# Altium footprint library Package_DFN_QFN.PcbLib: 735 footprints (part 21 of 46)
Each footprint in its own frame and in the unit in brackets; x right, y up, seen from the top. Pads: shape width x height; smd on the part's side, far side on the other; paste and mask are expansions set on the pad; w line width, h text height; cw(c..) or ccw(c..) is an arc to the next point about the centre after c.
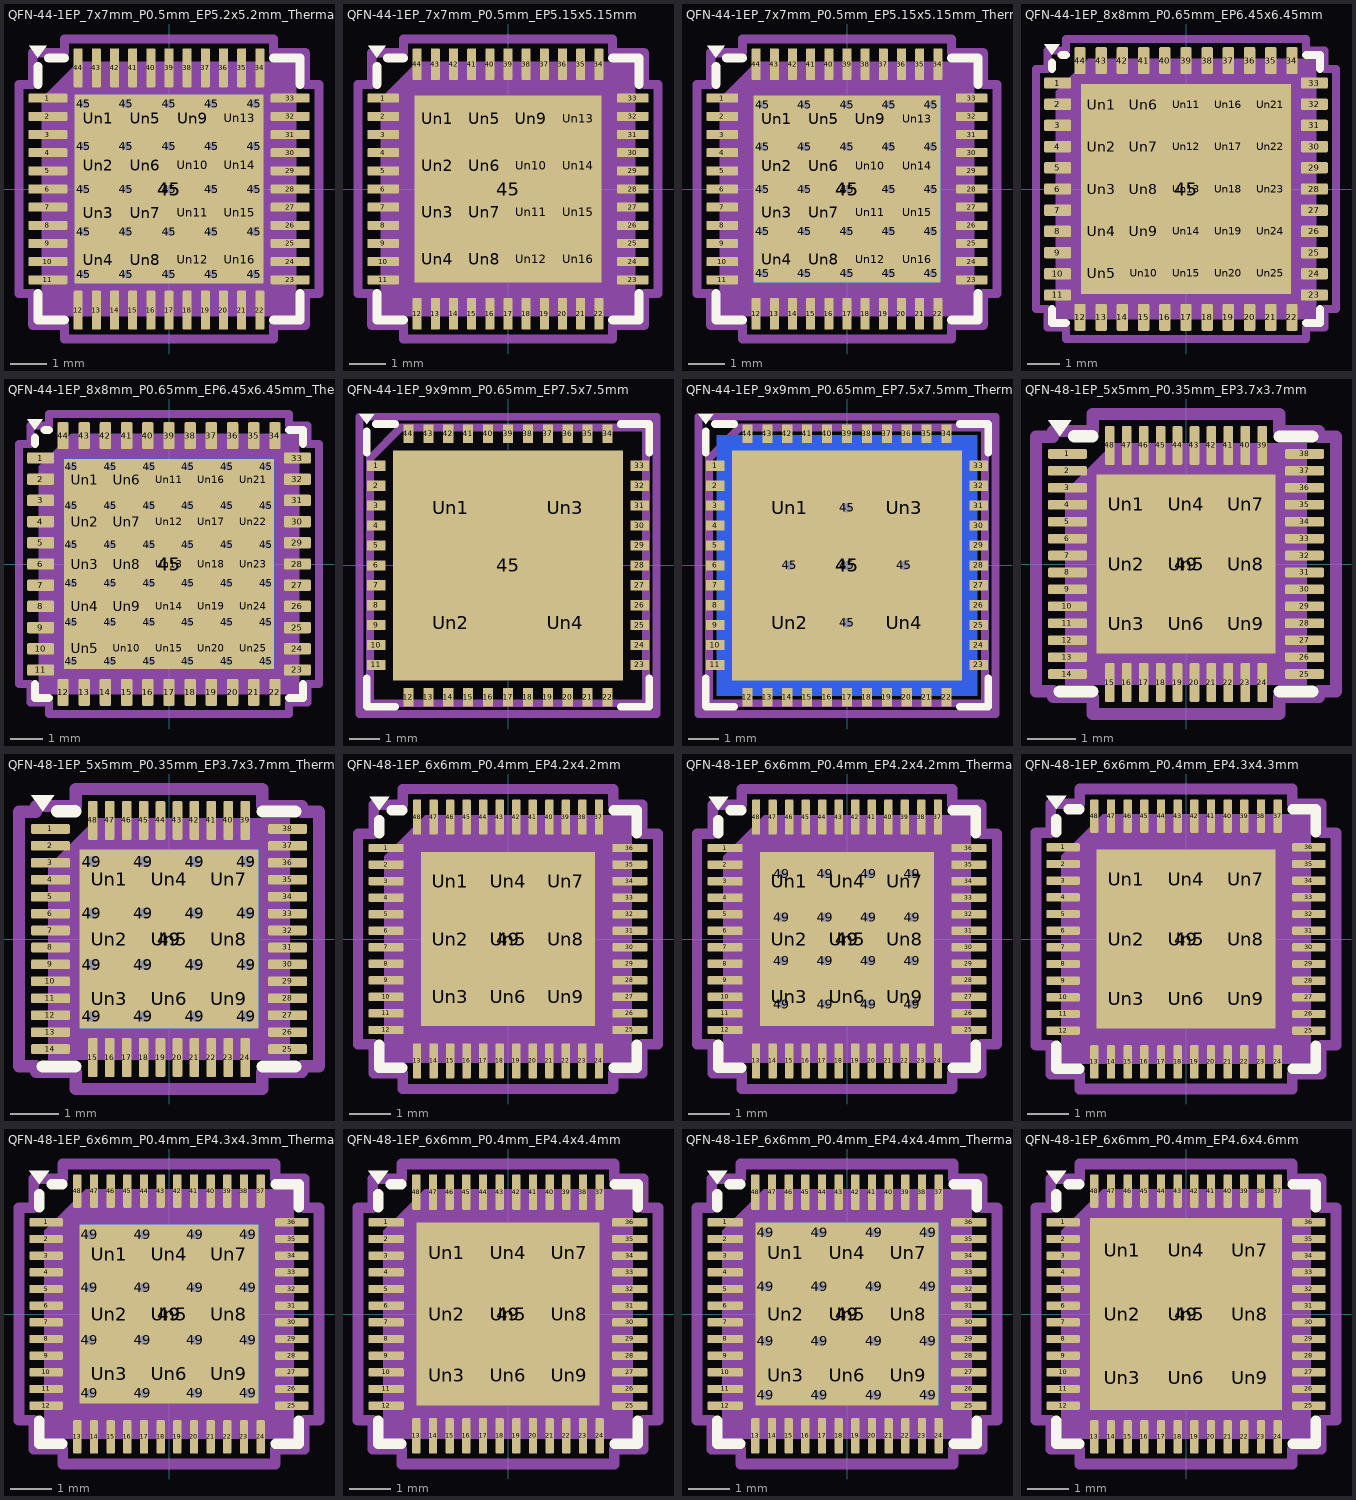
[diagram p20: the footprints below, top view; thin cyan lines are the x and y axes]

## QFN-44-1EP_7x7mm_P0.5mm_EP5.2x5.2mm_ThermalVias [mm] "QFN-44-1EP_7x7mm_P0.5mm_EP5.2x5.2mm_ThermalVias"
pads (87):
  rrect25% 1.075x0.25 smd: 1(-3.337,2.5) 2(-3.337,2) 3(-3.337,1.5) 4(-3.337,1) 5(-3.337,0.5) 6(-3.337,0) 7(-3.337,-0.5) 8(-3.337,-1) 9(-3.337,-1.5) 10(-3.337,-2) 11(-3.337,-2.5) 23(3.337,-2.5) 24(3.337,-2) 25(3.337,-1.5) 26(3.337,-1) 27(3.337,-0.5) 28(3.337,0) 29(3.337,0.5) 30(3.337,1) 31(3.337,1.5) 32(3.337,2) 33(3.337,2.5)
  rrect25% 0.25x1.075 smd: 12(-2.5,-3.337) 13(-2,-3.337) 14(-1.5,-3.337) 15(-1,-3.337) 16(-0.5,-3.337) 17(0,-3.337) 18(0.5,-3.337) 19(1,-3.337) 20(1.5,-3.337) 21(2,-3.337) 22(2.5,-3.337) 34(2.5,3.337) 35(2,3.337) 36(1.5,3.337) 37(1,3.337) 38(0.5,3.337) 39(0,3.337) 40(-0.5,3.337) 41(-1,3.337) 42(-1.5,3.337) 43(-2,3.337) 44(-2.5,3.337)
  round 0.5 hole 0.2: 45(-2.35,-2.35) 45(-2.35,-1.175) 45(-2.35,0) 45(-2.35,1.175) 45(-2.35,2.35) 45(-1.175,-2.35) 45(-1.175,-1.175) 45(-1.175,0) 45(-1.175,1.175) 45(-1.175,2.35) 45(0,-2.35) 45(0,-1.175) 45(0,0) 45(0,1.175) 45(0,2.35) 45(1.175,-2.35) 45(1.175,-1.175) 45(1.175,0) 45(1.175,1.175) 45(1.175,2.35) 45(2.35,-2.35) 45(2.35,-1.175) 45(2.35,0) 45(2.35,1.175) 45(2.35,2.35)
  rect 5.2x5.2 smd: 45(0,0)
  rect 5.2x5.2 smd far side: 45(0,0)
  rrect25% 1.01x1.01 on Top Paste: Un1(-1.95,1.95) Un2(-1.95,0.65) Un3(-1.95,-0.65) Un4(-1.95,-1.95) Un5(-0.65,1.95) Un6(-0.65,0.65) Un7(-0.65,-0.65) Un8(-0.65,-1.95) Un9(0.65,1.95) Un10(0.65,0.65) Un11(0.65,-0.65) Un12(0.65,-1.95) Un13(1.95,1.95) Un14(1.95,0.65) Un15(1.95,-0.65) Un16(1.95,-1.95)
F.SilkS:
  region: -3.61,3.61 -3.85,3.94 -3.37,3.94
  lines w0.254: -3.61,-2.885 -3.61,-3.61 -2.885,-3.61 ; -3.61,2.885 -3.61,3.37 ; -3.31,3.61 -2.885,3.61 ; 2.885,-3.61 3.61,-3.61 3.61,-2.885 ; 2.885,3.61 3.61,3.61 3.61,2.885
Top Component Center:
  lines w0.127: -0.127,0 0.127,0 -0.127,0 ; 0,-0.127 0,0.127 0,-0.127
Top Assembly:
  region: 3.5,-3.5 -3.5,-3.5 -3.5,2.5 -2.5,3.5 3.5,3.5
Top Courtyard:
  lines w0.254: -4.13,-2.88 -3.75,-2.88 -3.75,-3.75 -2.88,-3.75 -2.88,-4.13 2.88,-4.13 2.88,-3.75 3.75,-3.75 3.75,-2.88 4.13,-2.88 4.13,2.88 3.75,2.88 3.75,3.75 2.88,3.75 2.88,4.13 -2.88,4.13 -2.88,3.75 -3.75,3.75 -3.75,2.88 -4.13,2.88 -4.13,-2.88
Top Designator:
  text ".Designator" at -3.43,-0.344 h1.52
3D body "QFN-44-1EP_7x7mm_P0.5mm_EP5.15x5.15mm.step": height 0.77, standoff 0, extent -3.5,-3.5 3.5,3.5

## QFN-44-1EP_7x7mm_P0.5mm_EP5.15x5.15mm [mm] "QFN-44-1EP_7x7mm_P0.5mm_EP5.15x5.15mm"
pads (61):
  rrect25% 0.875x0.25 smd: 1(-3.437,2.5) 2(-3.437,2) 3(-3.437,1.5) 4(-3.437,1) 5(-3.437,0.5) 6(-3.437,0) 7(-3.437,-0.5) 8(-3.437,-1) 9(-3.437,-1.5) 10(-3.437,-2) 11(-3.437,-2.5) 23(3.437,-2.5) 24(3.437,-2) 25(3.437,-1.5) 26(3.437,-1) 27(3.437,-0.5) 28(3.437,0) 29(3.437,0.5) 30(3.437,1) 31(3.437,1.5) 32(3.437,2) 33(3.437,2.5)
  rrect25% 0.25x0.875 smd: 12(-2.5,-3.437) 13(-2,-3.437) 14(-1.5,-3.437) 15(-1,-3.437) 16(-0.5,-3.437) 17(0,-3.437) 18(0.5,-3.437) 19(1,-3.437) 20(1.5,-3.437) 21(2,-3.437) 22(2.5,-3.437) 34(2.5,3.437) 35(2,3.437) 36(1.5,3.437) 37(1,3.437) 38(0.5,3.437) 39(0,3.437) 40(-0.5,3.437) 41(-1,3.437) 42(-1.5,3.437) 43(-2,3.437) 44(-2.5,3.437)
  rect 5.15x5.15 smd: 45(0,0)
  rrect24% 1.04x1.04 on Top Paste: Un1(-1.935,1.935) Un2(-1.935,0.645) Un3(-1.935,-0.645) Un4(-1.935,-1.935) Un5(-0.645,1.935) Un6(-0.645,0.645) Un7(-0.645,-0.645) Un8(-0.645,-1.935) Un9(0.645,1.935) Un10(0.645,0.645) Un11(0.645,-0.645) Un12(0.645,-1.935) Un13(1.935,1.935) Un14(1.935,0.645) Un15(1.935,-0.645) Un16(1.935,-1.935)
F.SilkS:
  region: -3.61,3.61 -3.85,3.94 -3.37,3.94
  lines w0.254: -3.61,-2.885 -3.61,-3.61 -2.885,-3.61 ; -3.61,2.885 -3.61,3.37 ; -3.31,3.61 -2.885,3.61 ; 2.885,-3.61 3.61,-3.61 3.61,-2.885 ; 2.885,3.61 3.61,3.61 3.61,2.885
Top Component Center:
  lines w0.127: -0.127,0 0.127,0 -0.127,0 ; 0,-0.127 0,0.127 0,-0.127
Top Assembly:
  region: 3.5,-3.5 -3.5,-3.5 -3.5,2.5 -2.5,3.5 3.5,3.5
Top Courtyard:
  lines w0.254: -4.13,-2.88 -3.75,-2.88 -3.75,-3.75 -2.88,-3.75 -2.88,-4.13 2.88,-4.13 2.88,-3.75 3.75,-3.75 3.75,-2.88 4.13,-2.88 4.13,2.88 3.75,2.88 3.75,3.75 2.88,3.75 2.88,4.13 -2.88,4.13 -2.88,3.75 -3.75,3.75 -3.75,2.88 -4.13,2.88 -4.13,-2.88
Top Designator:
  text ".Designator" at -3.43,-0.344 h1.52
3D body "QFN-44-1EP_7x7mm_P0.5mm_EP5.15x5.15mm.step": height 0.77, standoff 0, extent -3.5,-3.5 3.5,3.5

## QFN-44-1EP_7x7mm_P0.5mm_EP5.15x5.15mm_ThermalVias [mm] "QFN-44-1EP_7x7mm_P0.5mm_EP5.15x5.15mm_ThermalVias"
pads (87):
  rrect25% 0.875x0.25 smd: 1(-3.437,2.5) 2(-3.437,2) 3(-3.437,1.5) 4(-3.437,1) 5(-3.437,0.5) 6(-3.437,0) 7(-3.437,-0.5) 8(-3.437,-1) 9(-3.437,-1.5) 10(-3.437,-2) 11(-3.437,-2.5) 23(3.437,-2.5) 24(3.437,-2) 25(3.437,-1.5) 26(3.437,-1) 27(3.437,-0.5) 28(3.437,0) 29(3.437,0.5) 30(3.437,1) 31(3.437,1.5) 32(3.437,2) 33(3.437,2.5)
  rrect25% 0.25x0.875 smd: 12(-2.5,-3.437) 13(-2,-3.437) 14(-1.5,-3.437) 15(-1,-3.437) 16(-0.5,-3.437) 17(0,-3.437) 18(0.5,-3.437) 19(1,-3.437) 20(1.5,-3.437) 21(2,-3.437) 22(2.5,-3.437) 34(2.5,3.437) 35(2,3.437) 36(1.5,3.437) 37(1,3.437) 38(0.5,3.437) 39(0,3.437) 40(-0.5,3.437) 41(-1,3.437) 42(-1.5,3.437) 43(-2,3.437) 44(-2.5,3.437)
  round 0.5 hole 0.2: 45(-2.325,-2.325) 45(-2.325,-1.162) 45(-2.325,0) 45(-2.325,1.162) 45(-2.325,2.325) 45(-1.162,-2.325) 45(-1.162,-1.162) 45(-1.162,0) 45(-1.162,1.162) 45(-1.162,2.325) 45(0,-2.325) 45(0,-1.162) 45(0,0) 45(0,1.162) 45(0,2.325) 45(1.162,-2.325) 45(1.162,-1.162) 45(1.162,0) 45(1.162,1.162) 45(1.162,2.325) 45(2.325,-2.325) 45(2.325,-1.162) 45(2.325,0) 45(2.325,1.162) 45(2.325,2.325)
  rect 5.15x5.15 smd: 45(0,0)
  rect 5.15x5.15 smd far side: 45(0,0)
  rrect25% 1x1 on Top Paste: Un1(-1.935,1.935) Un2(-1.935,0.645) Un3(-1.935,-0.645) Un4(-1.935,-1.935) Un5(-0.645,1.935) Un6(-0.645,0.645) Un7(-0.645,-0.645) Un8(-0.645,-1.935) Un9(0.645,1.935) Un10(0.645,0.645) Un11(0.645,-0.645) Un12(0.645,-1.935) Un13(1.935,1.935) Un14(1.935,0.645) Un15(1.935,-0.645) Un16(1.935,-1.935)
F.SilkS:
  region: -3.61,3.61 -3.85,3.94 -3.37,3.94
  lines w0.254: -3.61,-2.885 -3.61,-3.61 -2.885,-3.61 ; -3.61,2.885 -3.61,3.37 ; -3.31,3.61 -2.885,3.61 ; 2.885,-3.61 3.61,-3.61 3.61,-2.885 ; 2.885,3.61 3.61,3.61 3.61,2.885
Top Component Center:
  lines w0.127: -0.127,0 0.127,0 -0.127,0 ; 0,-0.127 0,0.127 0,-0.127
Top Assembly:
  region: 3.5,-3.5 -3.5,-3.5 -3.5,2.5 -2.5,3.5 3.5,3.5
Top Courtyard:
  lines w0.254: -4.13,-2.88 -4.13,2.88 -3.75,2.88 -3.75,3.75 -2.88,3.75 -2.88,4.13 2.88,4.13 2.88,3.75 3.75,3.75 3.75,2.88 4.13,2.88 4.13,-2.88 3.75,-2.88 3.75,-3.75 2.88,-3.75 2.88,-4.13 -2.88,-4.13 -2.88,-3.75 -3.75,-3.75 -3.75,-2.88 -4.13,-2.88
Top Designator:
  text ".Designator" at -3.43,-0.344 h1.52
3D body "QFN-44-1EP_7x7mm_P0.5mm_EP5.15x5.15mm.step": height 0.77, standoff 0, extent -3.5,-3.5 3.5,3.5

## QFN-44-1EP_8x8mm_P0.65mm_EP6.45x6.45mm [mm] "QFN-44-1EP_8x8mm_P0.65mm_EP6.45x6.45mm"
pads (70):
  rrect25% 0.825x0.35 smd: 1(-3.938,3.25) 2(-3.938,2.6) 3(-3.938,1.95) 4(-3.938,1.3) 5(-3.938,0.65) 6(-3.938,0) 7(-3.938,-0.65) 8(-3.938,-1.3) 9(-3.938,-1.95) 10(-3.938,-2.6) 11(-3.938,-3.25) 23(3.938,-3.25) 24(3.938,-2.6) 25(3.938,-1.95) 26(3.938,-1.3) 27(3.938,-0.65) 28(3.938,0) 29(3.938,0.65) 30(3.938,1.3) 31(3.938,1.95) 32(3.938,2.6) 33(3.938,3.25)
  rrect25% 0.35x0.825 smd: 12(-3.25,-3.938) 13(-2.6,-3.938) 14(-1.95,-3.938) 15(-1.3,-3.938) 16(-0.65,-3.938) 17(0,-3.938) 18(0.65,-3.938) 19(1.3,-3.938) 20(1.95,-3.938) 21(2.6,-3.938) 22(3.25,-3.938) 34(3.25,3.938) 35(2.6,3.938) 36(1.95,3.938) 37(1.3,3.938) 38(0.65,3.938) 39(0,3.938) 40(-0.65,3.938) 41(-1.3,3.938) 42(-1.95,3.938) 43(-2.6,3.938) 44(-3.25,3.938)
  rect 6.45x6.45 smd: 45(0,0)
  rrect24% 1.04x1.04 on Top Paste: Un1(-2.58,2.58) Un2(-2.58,1.29) Un3(-2.58,0) Un4(-2.58,-1.29) Un5(-2.58,-2.58) Un6(-1.29,2.58) Un7(-1.29,1.29) Un8(-1.29,0) Un9(-1.29,-1.29) Un10(-1.29,-2.58) Un11(0,2.58) Un12(0,1.29) Un13(0,0) Un14(0,-1.29) Un15(0,-2.58) Un16(1.29,2.58) Un17(1.29,1.29) Un18(1.29,0) Un19(1.29,-1.29) Un20(1.29,-2.58) Un21(2.58,2.58) Un22(2.58,1.29) Un23(2.58,0) Un24(2.58,-1.29) Un25(2.58,-2.58)
F.SilkS:
  region: -4.11,4.11 -4.35,4.44 -3.87,4.44
  lines w0.254: -4.11,-3.685 -4.11,-4.11 -3.685,-4.11 ; -4.11,3.685 -4.11,3.87 ; -3.81,4.11 -3.685,4.11 ; 3.685,-4.11 4.11,-4.11 4.11,-3.685 ; 3.685,4.11 4.11,4.11 4.11,3.685
Top Component Center:
  lines w0.127: -0.127,0 0.127,0 -0.127,0 ; 0,-0.127 0,0.127 0,-0.127
Top Assembly:
  region: 4,-4 -4,-4 -4,3 -3,4 4,4
Top Courtyard:
  lines w0.254: -4.6,-3.68 -4.6,3.68 -4.25,3.68 -4.25,4.25 -3.68,4.25 -3.68,4.6 3.68,4.6 3.68,4.25 4.25,4.25 4.25,3.68 4.6,3.68 4.6,-3.68 4.25,-3.68 4.25,-4.25 3.68,-4.25 3.68,-4.6 -3.68,-4.6 -3.68,-4.25 -4.25,-4.25 -4.25,-3.68 -4.6,-3.68
Top Designator:
  text ".Designator" at -3.43,-0.344 h1.52
3D body "QFN-44-1EP_8x8mm_P0.65mm_EP6.6x6.6mm.step": height 1, standoff 0, extent -4,-4 4,4

## QFN-44-1EP_8x8mm_P0.65mm_EP6.45x6.45mm_ThermalVias [mm] "QFN-44-1EP_8x8mm_P0.65mm_EP6.45x6.45mm_ThermalVias"
pads (107):
  rrect25% 0.825x0.35 smd: 1(-3.938,3.25) 2(-3.938,2.6) 3(-3.938,1.95) 4(-3.938,1.3) 5(-3.938,0.65) 6(-3.938,0) 7(-3.938,-0.65) 8(-3.938,-1.3) 9(-3.938,-1.95) 10(-3.938,-2.6) 11(-3.938,-3.25) 23(3.938,-3.25) 24(3.938,-2.6) 25(3.938,-1.95) 26(3.938,-1.3) 27(3.938,-0.65) 28(3.938,0) 29(3.938,0.65) 30(3.938,1.3) 31(3.938,1.95) 32(3.938,2.6) 33(3.938,3.25)
  rrect25% 0.35x0.825 smd: 12(-3.25,-3.938) 13(-2.6,-3.938) 14(-1.95,-3.938) 15(-1.3,-3.938) 16(-0.65,-3.938) 17(0,-3.938) 18(0.65,-3.938) 19(1.3,-3.938) 20(1.95,-3.938) 21(2.6,-3.938) 22(3.25,-3.938) 34(3.25,3.938) 35(2.6,3.938) 36(1.95,3.938) 37(1.3,3.938) 38(0.65,3.938) 39(0,3.938) 40(-0.65,3.938) 41(-1.3,3.938) 42(-1.95,3.938) 43(-2.6,3.938) 44(-3.25,3.938)
  round 0.5 hole 0.2: 45(-2.975,-2.975) 45(-2.975,-1.785) 45(-2.975,-0.595) 45(-2.975,0.595) 45(-2.975,1.785) 45(-2.975,2.975) 45(-1.785,-2.975) 45(-1.785,-1.785) 45(-1.785,-0.595) 45(-1.785,0.595) 45(-1.785,1.785) 45(-1.785,2.975) 45(-0.595,-2.975) 45(-0.595,-1.785) 45(-0.595,-0.595) 45(-0.595,0.595) 45(-0.595,1.785) 45(-0.595,2.975) 45(0.595,-2.975) 45(0.595,-1.785) 45(0.595,-0.595) 45(0.595,0.595) 45(0.595,1.785) 45(0.595,2.975) 45(1.785,-2.975) 45(1.785,-1.785) 45(1.785,-0.595) 45(1.785,0.595) 45(1.785,1.785) 45(1.785,2.975) 45(2.975,-2.975) 45(2.975,-1.785) 45(2.975,-0.595) 45(2.975,0.595) 45(2.975,1.785) 45(2.975,2.975)
  rect 6.45x6.45 smd: 45(0,0)
  rect 6.45x6.45 smd far side: 45(0,0)
  rrect25% 1x1 on Top Paste: Un1(-2.58,2.58) Un2(-2.58,1.29) Un3(-2.58,0) Un4(-2.58,-1.29) Un5(-2.58,-2.58) Un6(-1.29,2.58) Un7(-1.29,1.29) Un8(-1.29,0) Un9(-1.29,-1.29) Un10(-1.29,-2.58) Un11(0,2.58) Un12(0,1.29) Un13(0,0) Un14(0,-1.29) Un15(0,-2.58) Un16(1.29,2.58) Un17(1.29,1.29) Un18(1.29,0) Un19(1.29,-1.29) Un20(1.29,-2.58) Un21(2.58,2.58) Un22(2.58,1.29) Un23(2.58,0) Un24(2.58,-1.29) Un25(2.58,-2.58)
F.SilkS:
  region: -4.11,4.11 -4.35,4.44 -3.87,4.44
  lines w0.254: -4.11,-3.685 -4.11,-4.11 -3.685,-4.11 ; -4.11,3.685 -4.11,3.87 ; -3.81,4.11 -3.685,4.11 ; 3.685,-4.11 4.11,-4.11 4.11,-3.685 ; 3.685,4.11 4.11,4.11 4.11,3.685
Top Component Center:
  lines w0.127: -0.127,0 0.127,0 -0.127,0 ; 0,-0.127 0,0.127 0,-0.127
Top Assembly:
  region: 4,-4 -4,-4 -4,3 -3,4 4,4
Top Courtyard:
  lines w0.254: -4.6,-3.68 -4.6,3.68 -4.25,3.68 -4.25,4.25 -3.68,4.25 -3.68,4.6 3.68,4.6 3.68,4.25 4.25,4.25 4.25,3.68 4.6,3.68 4.6,-3.68 4.25,-3.68 4.25,-4.25 3.68,-4.25 3.68,-4.6 -3.68,-4.6 -3.68,-4.25 -4.25,-4.25 -4.25,-3.68 -4.6,-3.68
Top Designator:
  text ".Designator" at -3.43,-0.344 h1.52
3D body "QFN-44-1EP_8x8mm_P0.65mm_EP6.6x6.6mm.step": height 1, standoff 0, extent -4,-4 4,4

## QFN-44-1EP_9x9mm_P0.65mm_EP7.5x7.5mm [mm] "QFN-44-1EP_9x9mm_P0.65mm_EP7.5x7.5mm"
pads (49):
  rect 0.6x0.33 smd: 1(-4.3,3.25) 2(-4.3,2.6) 3(-4.3,1.95) 4(-4.3,1.3) 5(-4.3,0.65) 6(-4.3,0) 7(-4.3,-0.65) 8(-4.3,-1.3) 9(-4.3,-1.95) 10(-4.3,-2.6) 11(-4.3,-3.25) 23(4.3,-3.25) 24(4.3,-2.6) 25(4.3,-1.95) 26(4.3,-1.3) 27(4.3,-0.65) 28(4.3,0) 29(4.3,0.65) 30(4.3,1.3) 31(4.3,1.95) 32(4.3,2.6) 33(4.3,3.25)
  rect 0.33x0.6 smd: 12(-3.25,-4.3) 13(-2.6,-4.3) 14(-1.95,-4.3) 15(-1.3,-4.3) 16(-0.65,-4.3) 17(0,-4.3) 18(0.65,-4.3) 19(1.3,-4.3) 20(1.95,-4.3) 21(2.6,-4.3) 22(3.25,-4.3) 34(3.25,4.3) 35(2.6,4.3) 36(1.95,4.3) 37(1.3,4.3) 38(0.65,4.3) 39(0,4.3) 40(-0.65,4.3) 41(-1.3,4.3) 42(-1.95,4.3) 43(-2.6,4.3) 44(-3.25,4.3)
  rect 7.5x7.5 smd: 45(0,0)
  rect 2.65x2.65 on Top Paste: Un1(-1.875,1.875) Un2(-1.875,-1.875) Un3(1.875,1.875) Un4(1.875,-1.875)
F.SilkS:
  region: -4.61,4.61 -4.85,4.94 -4.37,4.94
  lines w0.254: -4.61,-3.68 -4.61,-4.61 -3.68,-4.61 ; -4.61,3.68 -4.61,4.37 ; -4.31,4.61 -3.68,4.61 ; 3.68,-4.61 4.61,-4.61 4.61,-3.68 ; 3.68,4.61 4.61,4.61 4.61,3.68
Top Component Center:
  lines w0.127: -0.127,0 0.127,0 -0.127,0 ; 0,-0.127 0,0.127 0,-0.127
Top Assembly:
  lines w0.254: -4.5,-4.5 -4.5,3.5 -3.5,4.5 4.5,4.5 4.5,-4.5 -4.5,-4.5
Top Courtyard:
  lines w0.254: -4.85,-4.85 -4.85,4.85 4.85,4.85 4.85,-4.85 -4.85,-4.85
Top Designator:
  text ".Designator" at -3.43,-0.344 h1.52

## QFN-44-1EP_9x9mm_P0.65mm_EP7.5x7.5mm_ThermalVias [mm] "QFN-44-1EP_9x9mm_P0.65mm_EP7.5x7.5mm_ThermalVias"
pads (55):
  rect 0.6x0.33 smd: 1(-4.3,3.25) 2(-4.3,2.6) 3(-4.3,1.95) 4(-4.3,1.3) 5(-4.3,0.65) 6(-4.3,0) 7(-4.3,-0.65) 8(-4.3,-1.3) 9(-4.3,-1.95) 10(-4.3,-2.6) 11(-4.3,-3.25) 23(4.3,-3.25) 24(4.3,-2.6) 25(4.3,-1.95) 26(4.3,-1.3) 27(4.3,-0.65) 28(4.3,0) 29(4.3,0.65) 30(4.3,1.3) 31(4.3,1.95) 32(4.3,2.6) 33(4.3,3.25)
  rect 0.33x0.6 smd: 12(-3.25,-4.3) 13(-2.6,-4.3) 14(-1.95,-4.3) 15(-1.3,-4.3) 16(-0.65,-4.3) 17(0,-4.3) 18(0.65,-4.3) 19(1.3,-4.3) 20(1.95,-4.3) 21(2.6,-4.3) 22(3.25,-4.3) 34(3.25,4.3) 35(2.6,4.3) 36(1.95,4.3) 37(1.3,4.3) 38(0.65,4.3) 39(0,4.3) 40(-0.65,4.3) 41(-1.3,4.3) 42(-1.95,4.3) 43(-2.6,4.3) 44(-3.25,4.3)
  round 0.6 hole 0.3: 45(-1.875,0) 45(0,-1.875) 45(0,0) 45(0,1.875) 45(1.875,0)
  rect 7.5x7.5 smd: 45(0,0)
  rect 8.5x8.5 smd far side: 45(0,0)
  rect 2.65x2.65 on Top Paste: Un1(-1.875,1.875) Un2(-1.875,-1.875) Un3(1.875,1.875) Un4(1.875,-1.875)
F.SilkS:
  region: -4.61,4.61 -4.85,4.94 -4.37,4.94
  lines w0.254: -4.61,-3.68 -4.61,-4.61 -3.68,-4.61 ; -4.61,3.68 -4.61,4.37 ; -4.31,4.61 -3.68,4.61 ; 3.68,-4.61 4.61,-4.61 4.61,-3.68 ; 3.68,4.61 4.61,4.61 4.61,3.68
Top Component Center:
  lines w0.127: -0.127,0 0.127,0 -0.127,0 ; 0,-0.127 0,0.127 0,-0.127
Top Assembly:
  lines w0.254: -4.5,-4.5 -4.5,3.5 -3.5,4.5 4.5,4.5 4.5,-4.5 -4.5,-4.5
Top Courtyard:
  lines w0.254: -4.85,-4.85 -4.85,4.85 4.85,4.85 4.85,-4.85 -4.85,-4.85
Top Designator:
  text ".Designator" at -3.43,-0.344 h1.52

## QFN-48-1EP_5x5mm_P0.35mm_EP3.7x3.7mm [mm] "QFN-48-1EP_5x5mm_P0.35mm_EP3.7x3.7mm"
pads (58):
  rrect25% 0.8x0.2 smd: 1(-2.45,2.275) 2(-2.45,1.925) 3(-2.45,1.575) 4(-2.45,1.225) 5(-2.45,0.875) 6(-2.45,0.525) 7(-2.45,0.175) 8(-2.45,-0.175) 9(-2.45,-0.525) 10(-2.45,-0.875) 11(-2.45,-1.225) 12(-2.45,-1.575) 13(-2.45,-1.925) 14(-2.45,-2.275) 25(2.45,-2.275) 26(2.45,-1.925) 27(2.45,-1.575) 28(2.45,-1.225) 29(2.45,-0.875) 30(2.45,-0.525) 31(2.45,-0.175) 32(2.45,0.175) 33(2.45,0.525) 34(2.45,0.875) 35(2.45,1.225) 36(2.45,1.575) 37(2.45,1.925) 38(2.45,2.275)
  rrect25% 0.2x0.8 smd: 15(-1.575,-2.45) 16(-1.225,-2.45) 17(-0.875,-2.45) 18(-0.525,-2.45) 19(-0.175,-2.45) 20(0.175,-2.45) 21(0.525,-2.45) 22(0.875,-2.45) 23(1.225,-2.45) 24(1.575,-2.45) 39(1.575,2.45) 40(1.225,2.45) 41(0.875,2.45) 42(0.525,2.45) 43(0.175,2.45) 44(-0.175,2.45) 45(-0.525,2.45) 46(-0.875,2.45) 47(-1.225,2.45) 48(-1.575,2.45)
  rect 3.7x3.7 smd: 49(0,0)
  rrect25% 0.99x0.99 on Top Paste: Un1(-1.23,1.23) Un2(-1.23,0) Un3(-1.23,-1.23) Un4(0,1.23) Un5(0,0) Un6(0,-1.23) Un7(1.23,1.23) Un8(1.23,0) Un9(1.23,-1.23)
F.SilkS:
  region: -2.61,2.64 -2.85,2.97 -2.37,2.97
  lines w0.254: -2.61,-2.635 -1.935,-2.635 ; -2.31,2.64 -1.935,2.64 ; 1.935,-2.635 2.61,-2.635 ; 1.935,2.635 2.61,2.635
Top Component Center:
  lines w0.127: -0.127,0 0.127,0 -0.127,0 ; 0,-0.127 0,0.127 0,-0.127
Top Assembly:
  region: 2.5,-2.5 -2.5,-2.5 -2.5,1.5 -1.5,2.5 2.5,2.5
Top Courtyard:
  lines w0.254: -3.1,-2.63 -3.1,2.63 -2.75,2.63 -2.75,2.75 -1.93,2.75 -1.93,3.1 1.93,3.1 1.93,2.75 2.75,2.75 2.75,2.63 3.1,2.63 3.1,-2.63 2.75,-2.63 2.75,-2.75 1.93,-2.75 1.93,-3.1 -1.93,-3.1 -1.93,-2.75 -2.75,-2.75 -2.75,-2.63 -3.1,-2.63
Top Designator:
  text ".Designator" at -3.43,-0.344 h1.52

## QFN-48-1EP_5x5mm_P0.35mm_EP3.7x3.7mm_ThermalVias [mm] "QFN-48-1EP_5x5mm_P0.35mm_EP3.7x3.7mm_ThermalVias"
pads (75):
  rrect25% 0.8x0.2 smd: 1(-2.45,2.275) 2(-2.45,1.925) 3(-2.45,1.575) 4(-2.45,1.225) 5(-2.45,0.875) 6(-2.45,0.525) 7(-2.45,0.175) 8(-2.45,-0.175) 9(-2.45,-0.525) 10(-2.45,-0.875) 11(-2.45,-1.225) 12(-2.45,-1.575) 13(-2.45,-1.925) 14(-2.45,-2.275) 25(2.45,-2.275) 26(2.45,-1.925) 27(2.45,-1.575) 28(2.45,-1.225) 29(2.45,-0.875) 30(2.45,-0.525) 31(2.45,-0.175) 32(2.45,0.175) 33(2.45,0.525) 34(2.45,0.875) 35(2.45,1.225) 36(2.45,1.575) 37(2.45,1.925) 38(2.45,2.275)
  rrect25% 0.2x0.8 smd: 15(-1.575,-2.45) 16(-1.225,-2.45) 17(-0.875,-2.45) 18(-0.525,-2.45) 19(-0.175,-2.45) 20(0.175,-2.45) 21(0.525,-2.45) 22(0.875,-2.45) 23(1.225,-2.45) 24(1.575,-2.45) 39(1.575,2.45) 40(1.225,2.45) 41(0.875,2.45) 42(0.525,2.45) 43(0.175,2.45) 44(-0.175,2.45) 45(-0.525,2.45) 46(-0.875,2.45) 47(-1.225,2.45) 48(-1.575,2.45)
  round 0.5 hole 0.2: 49(-1.6,-1.6) 49(-1.6,-0.533) 49(-1.6,0.533) 49(-1.6,1.6) 49(-0.533,-1.6) 49(-0.533,-0.533) 49(-0.533,0.533) 49(-0.533,1.6) 49(0.533,-1.6) 49(0.533,-0.533) 49(0.533,0.533) 49(0.533,1.6) 49(1.6,-1.6) 49(1.6,-0.533) 49(1.6,0.533) 49(1.6,1.6)
  rect 3.7x3.7 smd: 49(0,0)
  rect 3.7x3.7 smd far side: 49(0,0)
  rrect25% 0.96x0.96 on Top Paste: Un1(-1.23,1.23) Un2(-1.23,0) Un3(-1.23,-1.23) Un4(0,1.23) Un5(0,0) Un6(0,-1.23) Un7(1.23,1.23) Un8(1.23,0) Un9(1.23,-1.23)
F.SilkS:
  region: -2.61,2.64 -2.85,2.97 -2.37,2.97
  lines w0.254: -2.61,-2.635 -1.935,-2.635 ; -2.31,2.64 -1.935,2.64 ; 1.935,-2.635 2.61,-2.635 ; 1.935,2.635 2.61,2.635
Top Component Center:
  lines w0.127: -0.127,0 0.127,0 -0.127,0 ; 0,-0.127 0,0.127 0,-0.127
Top Assembly:
  region: 2.5,-2.5 -2.5,-2.5 -2.5,1.5 -1.5,2.5 2.5,2.5
Top Courtyard:
  lines w0.254: -3.1,-2.63 -3.1,2.63 -2.75,2.63 -2.75,2.75 -1.93,2.75 -1.93,3.1 1.93,3.1 1.93,2.75 2.75,2.75 2.75,2.63 3.1,2.63 3.1,-2.63 2.75,-2.63 2.75,-2.75 1.93,-2.75 1.93,-3.1 -1.93,-3.1 -1.93,-2.75 -2.75,-2.75 -2.75,-2.63 -3.1,-2.63
Top Designator:
  text ".Designator" at -3.43,-0.344 h1.52

## QFN-48-1EP_6x6mm_P0.4mm_EP4.2x4.2mm [mm] "QFN-48-1EP_6x6mm_P0.4mm_EP4.2x4.2mm"
pads (58):
  rrect25% 0.85x0.2 smd: 1(-2.95,2.2) 2(-2.95,1.8) 3(-2.95,1.4) 4(-2.95,1) 5(-2.95,0.6) 6(-2.95,0.2) 7(-2.95,-0.2) 8(-2.95,-0.6) 9(-2.95,-1) 10(-2.95,-1.4) 11(-2.95,-1.8) 12(-2.95,-2.2) 25(2.95,-2.2) 26(2.95,-1.8) 27(2.95,-1.4) 28(2.95,-1) 29(2.95,-0.6) 30(2.95,-0.2) 31(2.95,0.2) 32(2.95,0.6) 33(2.95,1) 34(2.95,1.4) 35(2.95,1.8) 36(2.95,2.2)
  rrect25% 0.2x0.85 smd: 13(-2.2,-2.95) 14(-1.8,-2.95) 15(-1.4,-2.95) 16(-1,-2.95) 17(-0.6,-2.95) 18(-0.2,-2.95) 19(0.2,-2.95) 20(0.6,-2.95) 21(1,-2.95) 22(1.4,-2.95) 23(1.8,-2.95) 24(2.2,-2.95) 37(2.2,2.95) 38(1.8,2.95) 39(1.4,2.95) 40(1,2.95) 41(0.6,2.95) 42(0.2,2.95) 43(-0.2,2.95) 44(-0.6,2.95) 45(-1,2.95) 46(-1.4,2.95) 47(-1.8,2.95) 48(-2.2,2.95)
  rect 4.2x4.2 smd: 49(0,0)
  rrect22% 1.13x1.13 on Top Paste: Un1(-1.4,1.4) Un2(-1.4,0) Un3(-1.4,-1.4) Un4(0,1.4) Un5(0,0) Un6(0,-1.4) Un7(1.4,1.4) Un8(1.4,0) Un9(1.4,-1.4)
F.SilkS:
  region: -3.11,3.11 -3.35,3.44 -2.87,3.44
  lines w0.254: -3.11,-2.56 -3.11,-3.11 -2.56,-3.11 ; -3.11,2.56 -3.11,2.87 ; -2.81,3.11 -2.56,3.11 ; 2.56,-3.11 3.11,-3.11 3.11,-2.56 ; 2.56,3.11 3.11,3.11 3.11,2.56
Top Component Center:
  lines w0.127: -0.127,0 0.127,0 -0.127,0 ; 0,-0.127 0,0.127 0,-0.127
Top Assembly:
  region: 3,-3 -3,-3 -3,2 -2,3 3,3
Top Courtyard:
  lines w0.254: -3.63,-2.55 -3.63,2.55 -3.25,2.55 -3.25,3.25 -2.55,3.25 -2.55,3.63 2.55,3.63 2.55,3.25 3.25,3.25 3.25,2.55 3.63,2.55 3.63,-2.55 3.25,-2.55 3.25,-3.25 2.55,-3.25 2.55,-3.63 -2.55,-3.63 -2.55,-3.25 -3.25,-3.25 -3.25,-2.55 -3.63,-2.55
Top Designator:
  text ".Designator" at -3.43,-0.344 h1.52

## QFN-48-1EP_6x6mm_P0.4mm_EP4.2x4.2mm_ThermalVias [mm] "QFN-48-1EP_6x6mm_P0.4mm_EP4.2x4.2mm_ThermalVias"
pads (75):
  rrect25% 0.85x0.2 smd: 1(-2.95,2.2) 2(-2.95,1.8) 3(-2.95,1.4) 4(-2.95,1) 5(-2.95,0.6) 6(-2.95,0.2) 7(-2.95,-0.2) 8(-2.95,-0.6) 9(-2.95,-1) 10(-2.95,-1.4) 11(-2.95,-1.8) 12(-2.95,-2.2) 25(2.95,-2.2) 26(2.95,-1.8) 27(2.95,-1.4) 28(2.95,-1) 29(2.95,-0.6) 30(2.95,-0.2) 31(2.95,0.2) 32(2.95,0.6) 33(2.95,1) 34(2.95,1.4) 35(2.95,1.8) 36(2.95,2.2)
  rrect25% 0.2x0.85 smd: 13(-2.2,-2.95) 14(-1.8,-2.95) 15(-1.4,-2.95) 16(-1,-2.95) 17(-0.6,-2.95) 18(-0.2,-2.95) 19(0.2,-2.95) 20(0.6,-2.95) 21(1,-2.95) 22(1.4,-2.95) 23(1.8,-2.95) 24(2.2,-2.95) 37(2.2,2.95) 38(1.8,2.95) 39(1.4,2.95) 40(1,2.95) 41(0.6,2.95) 42(0.2,2.95) 43(-0.2,2.95) 44(-0.6,2.95) 45(-1,2.95) 46(-1.4,2.95) 47(-1.8,2.95) 48(-2.2,2.95)
  round 0.5 hole 0.2: 49(-1.575,-1.575) 49(-1.575,-0.525) 49(-1.575,0.525) 49(-1.575,1.575) 49(-0.525,-1.575) 49(-0.525,-0.525) 49(-0.525,0.525) 49(-0.525,1.575) 49(0.525,-1.575) 49(0.525,-0.525) 49(0.525,0.525) 49(0.525,1.575) 49(1.575,-1.575) 49(1.575,-0.525) 49(1.575,0.525) 49(1.575,1.575)
  rect 4.2x4.2 smd: 49(0,0)
  rect 3.65x3.65 smd far side: 49(0,0)
  rrect22% 1.13x1.13 on Top Paste: Un1(-1.4,1.4) Un2(-1.4,0) Un3(-1.4,-1.4) Un4(0,1.4) Un5(0,0) Un6(0,-1.4) Un7(1.4,1.4) Un8(1.4,0) Un9(1.4,-1.4)
F.SilkS:
  region: -3.11,3.11 -3.35,3.44 -2.87,3.44
  lines w0.254: -3.11,-2.56 -3.11,-3.11 -2.56,-3.11 ; -3.11,2.56 -3.11,2.87 ; -2.81,3.11 -2.56,3.11 ; 2.56,-3.11 3.11,-3.11 3.11,-2.56 ; 2.56,3.11 3.11,3.11 3.11,2.56
Top Component Center:
  lines w0.127: -0.127,0 0.127,0 -0.127,0 ; 0,-0.127 0,0.127 0,-0.127
Top Assembly:
  region: 3,-3 -3,-3 -3,2 -2,3 3,3
Top Courtyard:
  lines w0.254: -3.63,-2.55 -3.63,2.55 -3.25,2.55 -3.25,3.25 -2.55,3.25 -2.55,3.63 2.55,3.63 2.55,3.25 3.25,3.25 3.25,2.55 3.63,2.55 3.63,-2.55 3.25,-2.55 3.25,-3.25 2.55,-3.25 2.55,-3.63 -2.55,-3.63 -2.55,-3.25 -3.25,-3.25 -3.25,-2.55 -3.63,-2.55
Top Designator:
  text ".Designator" at -3.43,-0.344 h1.52

## QFN-48-1EP_6x6mm_P0.4mm_EP4.3x4.3mm [mm] "QFN-48-1EP_6x6mm_P0.4mm_EP4.3x4.3mm"
pads (58):
  rrect25% 0.8x0.2 smd: 1(-2.95,2.2) 2(-2.95,1.8) 3(-2.95,1.4) 4(-2.95,1) 5(-2.95,0.6) 6(-2.95,0.2) 7(-2.95,-0.2) 8(-2.95,-0.6) 9(-2.95,-1) 10(-2.95,-1.4) 11(-2.95,-1.8) 12(-2.95,-2.2) 25(2.95,-2.2) 26(2.95,-1.8) 27(2.95,-1.4) 28(2.95,-1) 29(2.95,-0.6) 30(2.95,-0.2) 31(2.95,0.2) 32(2.95,0.6) 33(2.95,1) 34(2.95,1.4) 35(2.95,1.8) 36(2.95,2.2)
  rrect25% 0.2x0.8 smd: 13(-2.2,-2.95) 14(-1.8,-2.95) 15(-1.4,-2.95) 16(-1,-2.95) 17(-0.6,-2.95) 18(-0.2,-2.95) 19(0.2,-2.95) 20(0.6,-2.95) 21(1,-2.95) 22(1.4,-2.95) 23(1.8,-2.95) 24(2.2,-2.95) 37(2.2,2.95) 38(1.8,2.95) 39(1.4,2.95) 40(1,2.95) 41(0.6,2.95) 42(0.2,2.95) 43(-0.2,2.95) 44(-0.6,2.95) 45(-1,2.95) 46(-1.4,2.95) 47(-1.8,2.95) 48(-2.2,2.95)
  rect 4.3x4.3 smd: 49(0,0)
  rrect22% 1.16x1.16 on Top Paste: Un1(-1.43,1.43) Un2(-1.43,0) Un3(-1.43,-1.43) Un4(0,1.43) Un5(0,0) Un6(0,-1.43) Un7(1.43,1.43) Un8(1.43,0) Un9(1.43,-1.43)
F.SilkS:
  region: -3.11,3.11 -3.35,3.44 -2.87,3.44
  lines w0.254: -3.11,-2.56 -3.11,-3.11 -2.56,-3.11 ; -3.11,2.56 -3.11,2.87 ; -2.81,3.11 -2.56,3.11 ; 2.56,-3.11 3.11,-3.11 3.11,-2.56 ; 2.56,3.11 3.11,3.11 3.11,2.56
Top Component Center:
  lines w0.127: -0.127,0 0.127,0 -0.127,0 ; 0,-0.127 0,0.127 0,-0.127
Top Assembly:
  region: 3,-3 -3,-3 -3,2 -2,3 3,3
Top Courtyard:
  lines w0.254: -3.6,-2.55 -3.6,2.55 -3.25,2.55 -3.25,3.25 -2.55,3.25 -2.55,3.6 2.55,3.6 2.55,3.25 3.25,3.25 3.25,2.55 3.6,2.55 3.6,-2.55 3.25,-2.55 3.25,-3.25 2.55,-3.25 2.55,-3.6 -2.55,-3.6 -2.55,-3.25 -3.25,-3.25 -3.25,-2.55 -3.6,-2.55
Top Designator:
  text ".Designator" at -3.43,-0.344 h1.52

## QFN-48-1EP_6x6mm_P0.4mm_EP4.3x4.3mm_ThermalVias [mm] "QFN-48-1EP_6x6mm_P0.4mm_EP4.3x4.3mm_ThermalVias"
pads (75):
  rrect25% 0.8x0.2 smd: 1(-2.95,2.2) 2(-2.95,1.8) 3(-2.95,1.4) 4(-2.95,1) 5(-2.95,0.6) 6(-2.95,0.2) 7(-2.95,-0.2) 8(-2.95,-0.6) 9(-2.95,-1) 10(-2.95,-1.4) 11(-2.95,-1.8) 12(-2.95,-2.2) 25(2.95,-2.2) 26(2.95,-1.8) 27(2.95,-1.4) 28(2.95,-1) 29(2.95,-0.6) 30(2.95,-0.2) 31(2.95,0.2) 32(2.95,0.6) 33(2.95,1) 34(2.95,1.4) 35(2.95,1.8) 36(2.95,2.2)
  rrect25% 0.2x0.8 smd: 13(-2.2,-2.95) 14(-1.8,-2.95) 15(-1.4,-2.95) 16(-1,-2.95) 17(-0.6,-2.95) 18(-0.2,-2.95) 19(0.2,-2.95) 20(0.6,-2.95) 21(1,-2.95) 22(1.4,-2.95) 23(1.8,-2.95) 24(2.2,-2.95) 37(2.2,2.95) 38(1.8,2.95) 39(1.4,2.95) 40(1,2.95) 41(0.6,2.95) 42(0.2,2.95) 43(-0.2,2.95) 44(-0.6,2.95) 45(-1,2.95) 46(-1.4,2.95) 47(-1.8,2.95) 48(-2.2,2.95)
  round 0.5 hole 0.2: 49(-1.9,-1.9) 49(-1.9,-0.633) 49(-1.9,0.633) 49(-1.9,1.9) 49(-0.633,-1.9) 49(-0.633,-0.633) 49(-0.633,0.633) 49(-0.633,1.9) 49(0.633,-1.9) 49(0.633,-0.633) 49(0.633,0.633) 49(0.633,1.9) 49(1.9,-1.9) 49(1.9,-0.633) 49(1.9,0.633) 49(1.9,1.9)
  rect 4.3x4.3 smd: 49(0,0)
  rect 4.3x4.3 smd far side: 49(0,0)
  rrect22% 1.16x1.16 on Top Paste: Un1(-1.43,1.43) Un2(-1.43,0) Un3(-1.43,-1.43) Un4(0,1.43) Un5(0,0) Un6(0,-1.43) Un7(1.43,1.43) Un8(1.43,0) Un9(1.43,-1.43)
F.SilkS:
  region: -3.11,3.11 -3.35,3.44 -2.87,3.44
  lines w0.254: -3.11,-2.56 -3.11,-3.11 -2.56,-3.11 ; -3.11,2.56 -3.11,2.87 ; -2.81,3.11 -2.56,3.11 ; 2.56,-3.11 3.11,-3.11 3.11,-2.56 ; 2.56,3.11 3.11,3.11 3.11,2.56
Top Component Center:
  lines w0.127: -0.127,0 0.127,0 -0.127,0 ; 0,-0.127 0,0.127 0,-0.127
Top Assembly:
  region: 3,-3 -3,-3 -3,2 -2,3 3,3
Top Courtyard:
  lines w0.254: -3.6,-2.55 -3.6,2.55 -3.25,2.55 -3.25,3.25 -2.55,3.25 -2.55,3.6 2.55,3.6 2.55,3.25 3.25,3.25 3.25,2.55 3.6,2.55 3.6,-2.55 3.25,-2.55 3.25,-3.25 2.55,-3.25 2.55,-3.6 -2.55,-3.6 -2.55,-3.25 -3.25,-3.25 -3.25,-2.55 -3.6,-2.55
Top Designator:
  text ".Designator" at -3.43,-0.344 h1.52

## QFN-48-1EP_6x6mm_P0.4mm_EP4.4x4.4mm [mm] "QFN-48-1EP_6x6mm_P0.4mm_EP4.4x4.4mm"
pads (58):
  rrect25% 0.85x0.2 smd: 1(-2.925,2.2) 2(-2.925,1.8) 3(-2.925,1.4) 4(-2.925,1) 5(-2.925,0.6) 6(-2.925,0.2) 7(-2.925,-0.2) 8(-2.925,-0.6) 9(-2.925,-1) 10(-2.925,-1.4) 11(-2.925,-1.8) 12(-2.925,-2.2) 25(2.925,-2.2) 26(2.925,-1.8) 27(2.925,-1.4) 28(2.925,-1) 29(2.925,-0.6) 30(2.925,-0.2) 31(2.925,0.2) 32(2.925,0.6) 33(2.925,1) 34(2.925,1.4) 35(2.925,1.8) 36(2.925,2.2)
  rrect25% 0.2x0.85 smd: 13(-2.2,-2.925) 14(-1.8,-2.925) 15(-1.4,-2.925) 16(-1,-2.925) 17(-0.6,-2.925) 18(-0.2,-2.925) 19(0.2,-2.925) 20(0.6,-2.925) 21(1,-2.925) 22(1.4,-2.925) 23(1.8,-2.925) 24(2.2,-2.925) 37(2.2,2.925) 38(1.8,2.925) 39(1.4,2.925) 40(1,2.925) 41(0.6,2.925) 42(0.2,2.925) 43(-0.2,2.925) 44(-0.6,2.925) 45(-1,2.925) 46(-1.4,2.925) 47(-1.8,2.925) 48(-2.2,2.925)
  rect 4.4x4.4 smd: 49(0,0)
  rrect21% 1.18x1.18 on Top Paste: Un1(-1.47,1.47) Un2(-1.47,0) Un3(-1.47,-1.47) Un4(0,1.47) Un5(0,0) Un6(0,-1.47) Un7(1.47,1.47) Un8(1.47,0) Un9(1.47,-1.47)
F.SilkS:
  region: -3.11,3.11 -3.35,3.44 -2.87,3.44
  lines w0.254: -3.11,-2.56 -3.11,-3.11 -2.56,-3.11 ; -3.11,2.56 -3.11,2.87 ; -2.81,3.11 -2.56,3.11 ; 2.56,-3.11 3.11,-3.11 3.11,-2.56 ; 2.56,3.11 3.11,3.11 3.11,2.56
Top Component Center:
  lines w0.127: -0.127,0 0.127,0 -0.127,0 ; 0,-0.127 0,0.127 0,-0.127
Top Assembly:
  region: 3,-3 -3,-3 -3,2 -2,3 3,3
Top Courtyard:
  lines w0.254: -3.6,-2.55 -3.6,2.55 -3.25,2.55 -3.25,3.25 -2.55,3.25 -2.55,3.6 2.55,3.6 2.55,3.25 3.25,3.25 3.25,2.55 3.6,2.55 3.6,-2.55 3.25,-2.55 3.25,-3.25 2.55,-3.25 2.55,-3.6 -2.55,-3.6 -2.55,-3.25 -3.25,-3.25 -3.25,-2.55 -3.6,-2.55
Top Designator:
  text ".Designator" at -3.43,-0.344 h1.52

## QFN-48-1EP_6x6mm_P0.4mm_EP4.4x4.4mm_ThermalVias [mm] "QFN-48-1EP_6x6mm_P0.4mm_EP4.4x4.4mm_ThermalVias"
pads (75):
  rrect25% 0.85x0.2 smd: 1(-2.925,2.2) 2(-2.925,1.8) 3(-2.925,1.4) 4(-2.925,1) 5(-2.925,0.6) 6(-2.925,0.2) 7(-2.925,-0.2) 8(-2.925,-0.6) 9(-2.925,-1) 10(-2.925,-1.4) 11(-2.925,-1.8) 12(-2.925,-2.2) 25(2.925,-2.2) 26(2.925,-1.8) 27(2.925,-1.4) 28(2.925,-1) 29(2.925,-0.6) 30(2.925,-0.2) 31(2.925,0.2) 32(2.925,0.6) 33(2.925,1) 34(2.925,1.4) 35(2.925,1.8) 36(2.925,2.2)
  rrect25% 0.2x0.85 smd: 13(-2.2,-2.925) 14(-1.8,-2.925) 15(-1.4,-2.925) 16(-1,-2.925) 17(-0.6,-2.925) 18(-0.2,-2.925) 19(0.2,-2.925) 20(0.6,-2.925) 21(1,-2.925) 22(1.4,-2.925) 23(1.8,-2.925) 24(2.2,-2.925) 37(2.2,2.925) 38(1.8,2.925) 39(1.4,2.925) 40(1,2.925) 41(0.6,2.925) 42(0.2,2.925) 43(-0.2,2.925) 44(-0.6,2.925) 45(-1,2.925) 46(-1.4,2.925) 47(-1.8,2.925) 48(-2.2,2.925)
  round 0.5 hole 0.2: 49(-1.95,-1.95) 49(-1.95,-0.65) 49(-1.95,0.65) 49(-1.95,1.95) 49(-0.65,-1.95) 49(-0.65,-0.65) 49(-0.65,0.65) 49(-0.65,1.95) 49(0.65,-1.95) 49(0.65,-0.65) 49(0.65,0.65) 49(0.65,1.95) 49(1.95,-1.95) 49(1.95,-0.65) 49(1.95,0.65) 49(1.95,1.95)
  rect 4.4x4.4 smd: 49(0,0)
  rect 4.4x4.4 smd far side: 49(0,0)
  rrect21% 1.18x1.18 on Top Paste: Un1(-1.47,1.47) Un2(-1.47,0) Un3(-1.47,-1.47) Un4(0,1.47) Un5(0,0) Un6(0,-1.47) Un7(1.47,1.47) Un8(1.47,0) Un9(1.47,-1.47)
F.SilkS:
  region: -3.11,3.11 -3.35,3.44 -2.87,3.44
  lines w0.254: -3.11,-2.56 -3.11,-3.11 -2.56,-3.11 ; -3.11,2.56 -3.11,2.87 ; -2.81,3.11 -2.56,3.11 ; 2.56,-3.11 3.11,-3.11 3.11,-2.56 ; 2.56,3.11 3.11,3.11 3.11,2.56
Top Component Center:
  lines w0.127: -0.127,0 0.127,0 -0.127,0 ; 0,-0.127 0,0.127 0,-0.127
Top Assembly:
  region: 3,-3 -3,-3 -3,2 -2,3 3,3
Top Courtyard:
  lines w0.254: -3.6,-2.55 -3.25,-2.55 -3.25,-3.25 -2.55,-3.25 -2.55,-3.6 2.55,-3.6 2.55,-3.25 3.25,-3.25 3.25,-2.55 3.6,-2.55 3.6,2.55 3.25,2.55 3.25,3.25 2.55,3.25 2.55,3.6 -2.55,3.6 -2.55,3.25 -3.25,3.25 -3.25,2.55 -3.6,2.55 -3.6,-2.55
Top Designator:
  text ".Designator" at -3.43,-0.344 h1.52

## QFN-48-1EP_6x6mm_P0.4mm_EP4.6x4.6mm [mm] "QFN-48-1EP_6x6mm_P0.4mm_EP4.6x4.6mm"
pads (58):
  rrect25% 0.8x0.2 smd: 1(-2.95,2.2) 2(-2.95,1.8) 3(-2.95,1.4) 4(-2.95,1) 5(-2.95,0.6) 6(-2.95,0.2) 7(-2.95,-0.2) 8(-2.95,-0.6) 9(-2.95,-1) 10(-2.95,-1.4) 11(-2.95,-1.8) 12(-2.95,-2.2) 25(2.95,-2.2) 26(2.95,-1.8) 27(2.95,-1.4) 28(2.95,-1) 29(2.95,-0.6) 30(2.95,-0.2) 31(2.95,0.2) 32(2.95,0.6) 33(2.95,1) 34(2.95,1.4) 35(2.95,1.8) 36(2.95,2.2)
  rrect25% 0.2x0.8 smd: 13(-2.2,-2.95) 14(-1.8,-2.95) 15(-1.4,-2.95) 16(-1,-2.95) 17(-0.6,-2.95) 18(-0.2,-2.95) 19(0.2,-2.95) 20(0.6,-2.95) 21(1,-2.95) 22(1.4,-2.95) 23(1.8,-2.95) 24(2.2,-2.95) 37(2.2,2.95) 38(1.8,2.95) 39(1.4,2.95) 40(1,2.95) 41(0.6,2.95) 42(0.2,2.95) 43(-0.2,2.95) 44(-0.6,2.95) 45(-1,2.95) 46(-1.4,2.95) 47(-1.8,2.95) 48(-2.2,2.95)
  rect 4.6x4.6 smd: 49(0,0)
  rrect20% 1.24x1.24 on Top Paste: Un1(-1.53,1.53) Un2(-1.53,0) Un3(-1.53,-1.53) Un4(0,1.53) Un5(0,0) Un6(0,-1.53) Un7(1.53,1.53) Un8(1.53,0) Un9(1.53,-1.53)
F.SilkS:
  region: -3.11,3.11 -3.35,3.44 -2.87,3.44
  lines w0.254: -3.11,-2.56 -3.11,-3.11 -2.56,-3.11 ; -3.11,2.56 -3.11,2.87 ; -2.81,3.11 -2.56,3.11 ; 2.56,-3.11 3.11,-3.11 3.11,-2.56 ; 2.56,3.11 3.11,3.11 3.11,2.56
Top Component Center:
  lines w0.127: -0.127,0 0.127,0 -0.127,0 ; 0,-0.127 0,0.127 0,-0.127
Top Assembly:
  region: 3,-3 -3,-3 -3,2 -2,3 3,3
Top Courtyard:
  lines w0.254: -3.6,-2.55 -3.25,-2.55 -3.25,-3.25 -2.55,-3.25 -2.55,-3.6 2.55,-3.6 2.55,-3.25 3.25,-3.25 3.25,-2.55 3.6,-2.55 3.6,2.55 3.25,2.55 3.25,3.25 2.55,3.25 2.55,3.6 -2.55,3.6 -2.55,3.25 -3.25,3.25 -3.25,2.55 -3.6,2.55 -3.6,-2.55
Top Designator:
  text ".Designator" at -3.43,-0.344 h1.52